# Altium footprint library LAIL-PZ2.54-6P-L.PcbLib: 1 footprints
Each footprint in its own frame and in the unit in brackets; x right, y up, seen from the top. Pads: shape width x height; smd on the part's side, far side on the other; paste and mask are expansions set on the pad; w line width, h text height; cw(c..) or ccw(c..) is an arc to the next point about the centre after c.
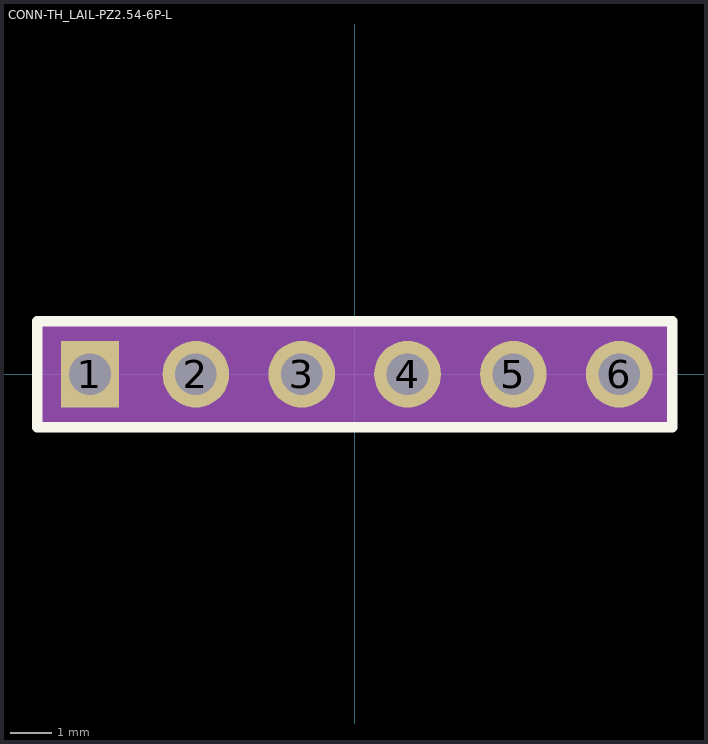
[diagram p0: the footprint, top view; thin cyan lines are the x and y axes]

## CONN-TH_LAIL-PZ2.54-6P-L [mm]
pads (6):
  rect 1.4x1.6 hole 1 paste-2539.97 mask+0.05: 1(-6.35,0)
  round 1.6 hole 1 paste-2539.97 mask+0.05: 2(-3.81,0) 3(-1.27,0) 4(1.27,0) 5(3.81,0) 6(6.35,0)
Top Overlay:
  lines w0.254: -7.62,-1.27 -7.62,1.27 7.62,1.27 7.62,-1.27 -7.62,-1.27
Mechanical 9:
  region: -7.62,-1.25 -7.62,1.25 7.62,1.25 7.62,-1.25
Mechanical 11:
  region: -7.59,1.25 -7.599,1.271 -7.62,1.28 -7.641,1.271 -7.65,1.25 -7.641,1.229 -7.62,1.22 -7.599,1.229
Mechanical 12:
  region: -6.67,0.32 -6.03,0.32 -6.03,-0.32 -6.67,-0.32
  region: -4.13,0.32 -3.49,0.32 -3.49,-0.32 -4.13,-0.32
  region: -1.59,0.32 -0.95,0.32 -0.95,-0.32 -1.59,-0.32
  region: 0.95,0.32 1.59,0.32 1.59,-0.32 0.95,-0.32
  region: 3.49,0.32 4.13,0.32 4.13,-0.32 3.49,-0.32
  region: 6.03,0.32 6.67,0.32 6.67,-0.32 6.03,-0.32